# Altium schematic symbol library Altium_Library.SchLib: 822 symbols (part 13 of 17)
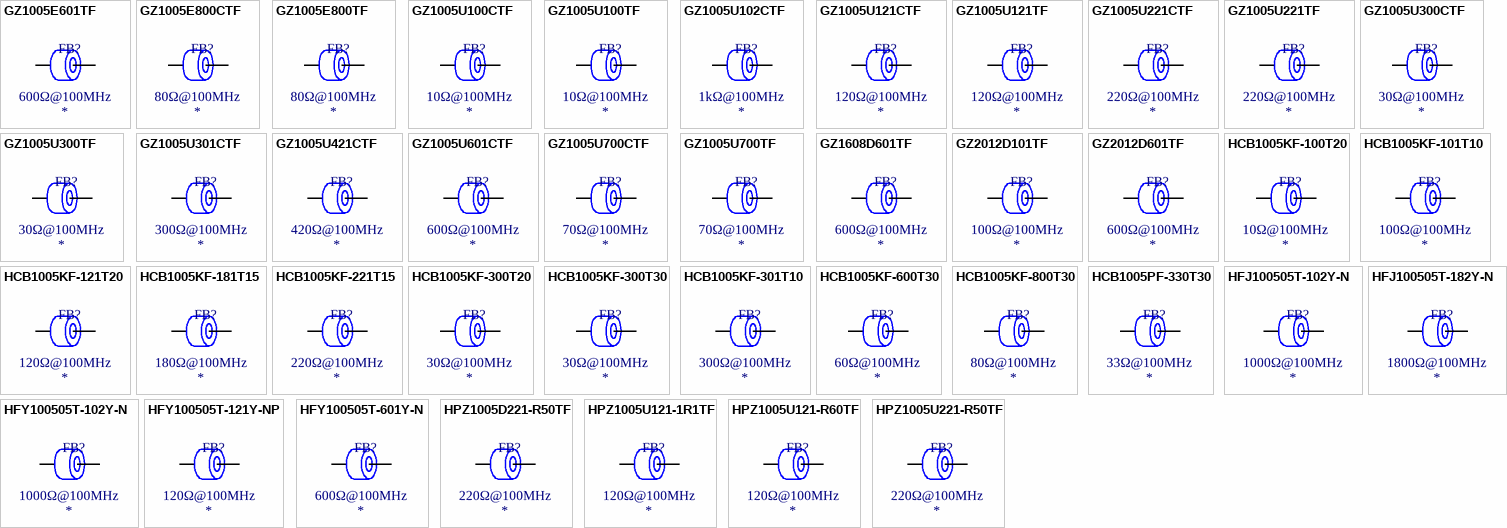
[diagram p32: symbols GZ1005E601TF to HPZ1005U221-R50TF]

## HCB1005KF-800T30
designator FB?  Impedance @ Frequency: 80Ω@100MHz
Ferrite, 80Ω@100MHz, ±25%, 40mΩ, 3A, SMD 0402; Manufacturer: TAI-TECH; Manufacturer Part Number: HCB1005KF-800T30; Package Size: 0402; JLCPCB Basic Part: No; JLCPCB Part Number: C2992343; Supplier 1: LCSC; Category: Ferrite Beads; Supplier Part Number 1: C2992343; Tolerance: ±25%; Rated Current: 3A; DC Resistance: 40mΩ; RoHS: Yes; ComponentLink1Description: Datasheet; ComponentLink1URL: https://wmsc.lcsc.com/wmsc/upload/file/pdf/v2/lcsc/2204251615_TAI-TECH-HCB1005KF-800T30_C2992343.pdf; ComponentLink2Description: JLCPCB Part URL; ComponentLink2URL: https://jlcpcb.com/partdetail/C2992343; ComponentLink3Description: LCSC Part URL; ComponentLink3URL: https://lcsc.com/product-detail/Ferrite-Beads_TAI-TECH-TAI-TECH-HCB1005KF-800T30_C2992343.html
footprint FB-0402 (0402 (1005M) Ferrite)
pins: 1, 2

## HCB1005PF-330T30
designator FB?  Impedance @ Frequency: 33Ω@100MHz
Ferrite, 33Ω@100MHz, ±25%, 22mΩ, 3A, SMD 0402; Manufacturer: TAI-TECH; Manufacturer Part Number: HCB1005PF-330T30; Package Size: 0402; JLCPCB Basic Part: No; JLCPCB Part Number: C155104; Supplier 1: LCSC; Category: Ferrite Beads; Supplier Part Number 1: C155104; Tolerance: ±25%; Rated Current: 3A; DC Resistance: 22mΩ; RoHS: Yes; ComponentLink1Description: Datasheet; ComponentLink1URL: https://wmsc.lcsc.com/wmsc/upload/file/pdf/v2/lcsc/2009171335_TAI-TECH-HCB1005PF-330T30_C155104.pdf; ComponentLink2Description: JLCPCB Part URL; ComponentLink2URL: https://jlcpcb.com/partdetail/C155104; ComponentLink3Description: LCSC Part URL; ComponentLink3URL: https://lcsc.com/product-detail/Ferrite-Beads_TAI-TECH-TAI-TECH-HCB1005PF-330T30_C155104.html
footprint FB-0402 (0402 (1005M) Ferrite)
pins: 1, 2

## HFJ100505T-102Y-N
designator FB?  Impedance @ Frequency: 1000Ω@100MHz
Ferrite, 1000Ω@100MHz, ±25%, 1.25Ω, 250mA, SMD 0402; Manufacturer: Chilisin Elec; Manufacturer Part Number: HFJ100505T-102Y-N; Package Size: 0402; JLCPCB Basic Part: No; JLCPCB Part Number: C365845; Supplier 1: LCSC; Category: Ferrite Beads; Supplier Part Number 1: C365845; Tolerance: ±25%; Rated Current: 250mA; DC Resistance: 1.25Ω; RoHS: Yes; ComponentLink1Description: Datasheet; ComponentLink1URL: https://wmsc.lcsc.com/wmsc/upload/file/pdf/v2/lcsc/1912111437_Chilisin-Elec-HFJ100505T-102Y-N_C365845.pdf; ComponentLink2Description: JLCPCB Part URL; ComponentLink2URL: https://jlcpcb.com/partdetail/C365845; ComponentLink3Description: LCSC Part URL; ComponentLink3URL: https://lcsc.com/product-detail/Ferrite-Beads_Chilisin-Elec-Chilisin-Elec-HFJ100505T-102Y-N_C365845.html
footprint FB-0402 (0402 (1005M) Ferrite)
pins: 1, 2

## HFJ100505T-182Y-N
designator FB?  Impedance @ Frequency: 1800Ω@100MHz
Ferrite, 1800Ω@100MHz, ±25%, 2.2Ω, 200mA, SMD 0402; Manufacturer: Chilisin Elec; Manufacturer Part Number: HFJ100505T-182Y-N; Package Size: 0402; JLCPCB Basic Part: No; JLCPCB Part Number: C285912; Supplier 1: LCSC; Category: Ferrite Beads; Supplier Part Number 1: C285912; Tolerance: ±25%; Rated Current: 200mA; DC Resistance: 2.2Ω; RoHS: Yes; ComponentLink1Description: Datasheet; ComponentLink1URL: https://wmsc.lcsc.com/wmsc/upload/file/pdf/v2/lcsc/1912111437_Chilisin-Elec-HFJ100505T-182Y-N_C285912.pdf; ComponentLink2Description: JLCPCB Part URL; ComponentLink2URL: https://jlcpcb.com/partdetail/C285912; ComponentLink3Description: LCSC Part URL; ComponentLink3URL: https://lcsc.com/product-detail/Ferrite-Beads_Chilisin-Elec-Chilisin-Elec-HFJ100505T-182Y-N_C285912.html
footprint FB-0402 (0402 (1005M) Ferrite)
pins: 1, 2

## HFY100505T-102Y-N
designator FB?  Impedance @ Frequency: 1000Ω@100MHz
Ferrite, 1000Ω@100MHz, ±25%, 1.1Ω, 250mA, SMD 0402; Manufacturer: Chilisin Elec; Manufacturer Part Number: HFY100505T-102Y-N; Package Size: 0402; JLCPCB Basic Part: No; JLCPCB Part Number: C108276; Supplier 1: LCSC; Category: Ferrite Beads; Supplier Part Number 1: C108276; Tolerance: ±25%; Rated Current: 250mA; DC Resistance: 1.1Ω; RoHS: Yes; ComponentLink1Description: Datasheet; ComponentLink1URL: https://wmsc.lcsc.com/wmsc/upload/file/pdf/v2/lcsc/1811141628_Chilisin-Elec-HFY100505T-102Y-N_C108276.pdf; ComponentLink2Description: JLCPCB Part URL; ComponentLink2URL: https://jlcpcb.com/partdetail/C108276; ComponentLink3Description: LCSC Part URL; ComponentLink3URL: https://lcsc.com/product-detail/Ferrite-Beads_Chilisin-Elec-Chilisin-Elec-HFY100505T-102Y-N_C108276.html
footprint FB-0402 (0402 (1005M) Ferrite)
pins: 1, 2

## HFY100505T-121Y-NP
designator FB?  Impedance @ Frequency: 120Ω@100MHz
Ferrite, 120Ω@100MHz, ±25%, 0.095Ω, 1500mA, SMD 0402; Manufacturer: Chilisin Elec; Manufacturer Part Number: HFY100505T-121Y-NP; Package Size: 0402; JLCPCB Basic Part: No; JLCPCB Part Number: C108277; Supplier 1: LCSC; Category: Ferrite Beads; Supplier Part Number 1: C108277; Tolerance: ±25%; Rated Current: 1500mA; DC Resistance: 0.095Ω; RoHS: Yes; ComponentLink1Description: Datasheet; ComponentLink1URL: https://wmsc.lcsc.com/wmsc/upload/file/pdf/v2/lcsc/1811141628_Chilisin-Elec-HFY100505T-121Y-NP_C108277.pdf; ComponentLink2Description: JLCPCB Part URL; ComponentLink2URL: https://jlcpcb.com/partdetail/C108277; ComponentLink3Description: LCSC Part URL; ComponentLink3URL: https://lcsc.com/product-detail/Ferrite-Beads_Chilisin-Elec-Chilisin-Elec-HFY100505T-121Y-NP_C108277.html
footprint FB-0402 (0402 (1005M) Ferrite)
pins: 1, 2

## HFY100505T-601Y-N
designator FB?  Impedance @ Frequency: 600Ω@100MHz
Ferrite, 600Ω@100MHz, ±25%, 0.7Ω, 300mA, SMD 0402; Manufacturer: Chilisin Elec; Manufacturer Part Number: HFY100505T-601Y-N; Package Size: 0402; JLCPCB Basic Part: No; JLCPCB Part Number: C142161; Supplier 1: LCSC; Category: Ferrite Beads; Supplier Part Number 1: C142161; Tolerance: ±25%; Rated Current: 300mA; DC Resistance: 0.7Ω; RoHS: Yes; ComponentLink1Description: Datasheet; ComponentLink1URL: https://wmsc.lcsc.com/wmsc/upload/file/pdf/v2/lcsc/1811141612_Chilisin-Elec-HFY100505T-601Y-N_C142161.pdf; ComponentLink2Description: JLCPCB Part URL; ComponentLink2URL: https://jlcpcb.com/partdetail/C142161; ComponentLink3Description: LCSC Part URL; ComponentLink3URL: https://lcsc.com/product-detail/Ferrite-Beads_Chilisin-Elec-Chilisin-Elec-HFY100505T-601Y-N_C142161.html
footprint FB-0402 (0402 (1005M) Ferrite)
pins: 1, 2

## HPZ1005D221-R50TF
designator FB?  Impedance @ Frequency: 220Ω@100MHz
Ferrite, 220Ω@100MHz, ±25%, 380mΩ, 500mA, SMD 0402; Manufacturer: Sunlord; Manufacturer Part Number: HPZ1005D221-R50TF; Package Size: 0402; JLCPCB Basic Part: No; JLCPCB Part Number: C369802; Supplier 1: LCSC; Category: Ferrite Beads; Supplier Part Number 1: C369802; Tolerance: ±25%; Rated Current: 500mA; DC Resistance: 380mΩ; RoHS: Yes; ComponentLink1Description: Datasheet; ComponentLink1URL: https://wmsc.lcsc.com/wmsc/upload/file/pdf/v2/lcsc/2310301509_Sunlord-HPZ1005D221-R50TF_C369802.pdf; ComponentLink2Description: JLCPCB Part URL; ComponentLink2URL: https://jlcpcb.com/partdetail/C369802; ComponentLink3Description: LCSC Part URL; ComponentLink3URL: https://lcsc.com/product-detail/Ferrite-Beads_Sunlord-Sunlord-HPZ1005D221-R50TF_C369802.html
footprint FB-0402 (0402 (1005M) Ferrite)
pins: 1, 2

## HPZ1005U121-1R1TF
designator FB?  Impedance @ Frequency: 120Ω@100MHz
Ferrite, 120Ω@100MHz, ±25%, 130mΩ, 1.1A, SMD 0402; Manufacturer: Sunlord; Manufacturer Part Number: HPZ1005U121-1R1TF; Package Size: 0402; JLCPCB Basic Part: No; JLCPCB Part Number: C185886; Supplier 1: LCSC; Category: Ferrite Beads; Supplier Part Number 1: C185886; Tolerance: ±25%; Rated Current: 1.1A; DC Resistance: 130mΩ; RoHS: Yes; ComponentLink1Description: Datasheet; ComponentLink1URL: https://wmsc.lcsc.com/wmsc/upload/file/pdf/v2/lcsc/2310301640_Sunlord-HPZ1005U121-1R1TF_C185886.pdf; ComponentLink2Description: JLCPCB Part URL; ComponentLink2URL: https://jlcpcb.com/partdetail/C185886; ComponentLink3Description: LCSC Part URL; ComponentLink3URL: https://lcsc.com/product-detail/Ferrite-Beads_Sunlord-Sunlord-HPZ1005U121-1R1TF_C185886.html
footprint FB-0402 (0402 (1005M) Ferrite)
pins: 1, 2

## HPZ1005U121-R60TF
designator FB?  Impedance @ Frequency: 120Ω@100MHz
Ferrite, 120Ω@100MHz, ±25%, 250mΩ, 600mA, SMD 0402; Manufacturer: Sunlord; Manufacturer Part Number: HPZ1005U121-R60TF; Package Size: 0402; JLCPCB Basic Part: No; JLCPCB Part Number: C369803; Supplier 1: LCSC; Category: Ferrite Beads; Supplier Part Number 1: C369803; Tolerance: ±25%; Rated Current: 600mA; DC Resistance: 250mΩ; RoHS: Yes; ComponentLink1Description: Datasheet; ComponentLink1URL: https://wmsc.lcsc.com/wmsc/upload/file/pdf/v2/lcsc/2310301640_Sunlord-HPZ1005U121-R60TF_C369803.pdf; ComponentLink2Description: JLCPCB Part URL; ComponentLink2URL: https://jlcpcb.com/partdetail/C369803; ComponentLink3Description: LCSC Part URL; ComponentLink3URL: https://lcsc.com/product-detail/Ferrite-Beads_Sunlord-Sunlord-HPZ1005U121-R60TF_C369803.html
footprint FB-0402 (0402 (1005M) Ferrite)
pins: 1, 2

## HPZ1005U221-R50TF
designator FB?  Impedance @ Frequency: 220Ω@100MHz
Ferrite, 220Ω@100MHz, ±25%, 380mΩ, 500mA, SMD 0402; Manufacturer: Sunlord; Manufacturer Part Number: HPZ1005U221-R50TF; Package Size: 0402; JLCPCB Basic Part: No; JLCPCB Part Number: C279857; Supplier 1: LCSC; Category: Ferrite Beads; Supplier Part Number 1: C279857; Tolerance: ±25%; Rated Current: 500mA; DC Resistance: 380mΩ; RoHS: Yes; ComponentLink1Description: Datasheet; ComponentLink1URL: https://wmsc.lcsc.com/wmsc/upload/file/pdf/v2/lcsc/2310301640_Sunlord-HPZ1005U221-R50TF_C279857.pdf; ComponentLink2Description: JLCPCB Part URL; ComponentLink2URL: https://jlcpcb.com/partdetail/C279857; ComponentLink3Description: LCSC Part URL; ComponentLink3URL: https://lcsc.com/product-detail/Ferrite-Beads_Sunlord-Sunlord-HPZ1005U221-R50TF_C279857.html
footprint FB-0402 (0402 (1005M) Ferrite)
pins: 1, 2

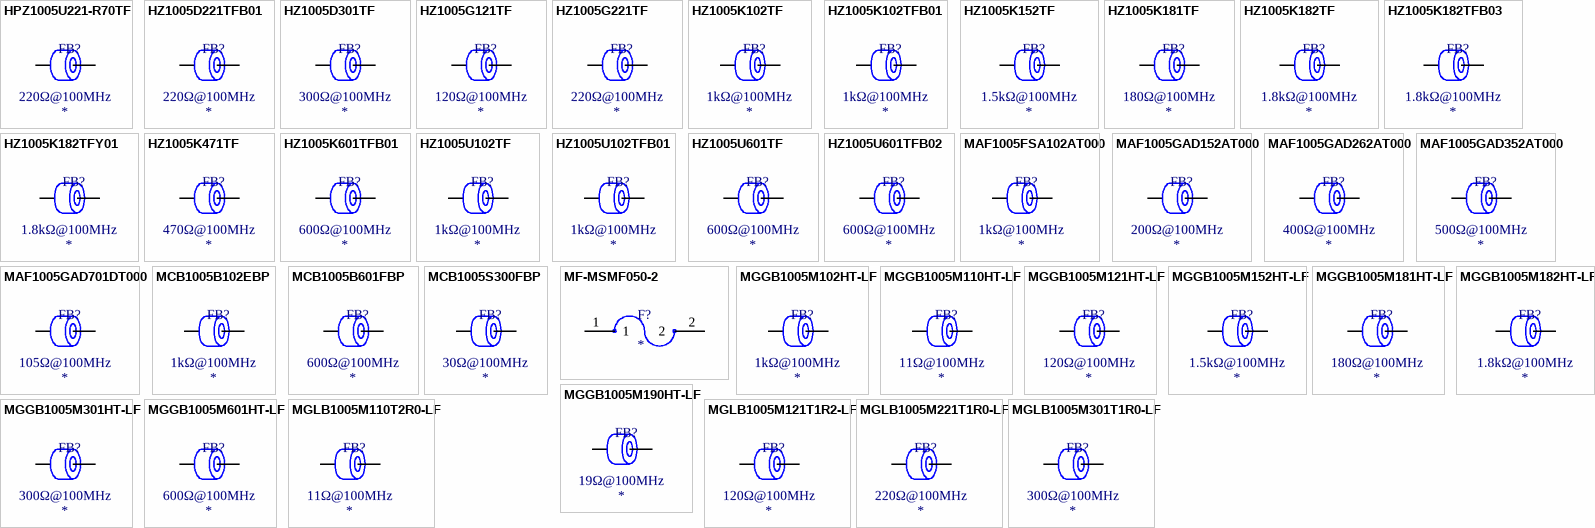
[diagram p15: symbols HPZ1005U221-R70TF to MGLB1005M301T1R0-LF]

## HPZ1005U221-R70TF
designator FB?  Impedance @ Frequency: 220Ω@100MHz
Ferrite, 220Ω@100MHz, ±25%, 700mΩ, 250mA, SMD 0402; Manufacturer: Sunlord; Manufacturer Part Number: HPZ1005U221-R70TF; Package Size: 0402; JLCPCB Basic Part: No; JLCPCB Part Number: C154130; Supplier 1: LCSC; Category: Ferrite Beads; Supplier Part Number 1: C154130; Tolerance: ±25%; Rated Current: 250mA; DC Resistance: 700mΩ; RoHS: Yes; ComponentLink1Description: Datasheet; ComponentLink1URL: https://wmsc.lcsc.com/wmsc/upload/file/pdf/v2/lcsc/2310301640_Sunlord-HPZ1005U221-R70TF_C154130.pdf; ComponentLink2Description: JLCPCB Part URL; ComponentLink2URL: https://jlcpcb.com/partdetail/C154130; ComponentLink3Description: LCSC Part URL; ComponentLink3URL: https://lcsc.com/product-detail/Ferrite-Beads_Sunlord-Sunlord-HPZ1005U221-R70TF_C154130.html
footprint FB-0402 (0402 (1005M) Ferrite)
pins: 1, 2

## HZ1005D221TFB01
designator FB?  Impedance @ Frequency: 220Ω@100MHz
Ferrite, 220Ω@100MHz, ±25%, 500mΩ, 300mA, SMD 0402; Manufacturer: Sunlord; Manufacturer Part Number: HZ1005D221TFB01; Package Size: 0402; JLCPCB Basic Part: No; JLCPCB Part Number: C185880; Supplier 1: LCSC; Category: Ferrite Beads; Supplier Part Number 1: C185880; Tolerance: ±25%; Rated Current: 300mA; DC Resistance: 500mΩ; RoHS: Yes; ComponentLink1Description: Datasheet; ComponentLink1URL: https://wmsc.lcsc.com/wmsc/upload/file/pdf/v2/lcsc/2310301640_Sunlord-HZ1005D221TFB01_C185880.pdf; ComponentLink2Description: JLCPCB Part URL; ComponentLink2URL: https://jlcpcb.com/partdetail/C185880; ComponentLink3Description: LCSC Part URL; ComponentLink3URL: https://lcsc.com/product-detail/Ferrite-Beads_Sunlord-Sunlord-HZ1005D221TFB01_C185880.html
footprint FB-0402 (0402 (1005M) Ferrite)
pins: 1, 2

## HZ1005D301TF
designator FB?  Impedance @ Frequency: 300Ω@100MHz
Ferrite, 300Ω@100MHz, ±25%, 1Ω, 100mA, SMD 0402; Manufacturer: Sunlord; Manufacturer Part Number: HZ1005D301TF; Package Size: 0402; JLCPCB Basic Part: No; JLCPCB Part Number: C185881; Supplier 1: LCSC; Category: Ferrite Beads; Supplier Part Number 1: C185881; Tolerance: ±25%; Rated Current: 100mA; DC Resistance: 1Ω; RoHS: Yes; ComponentLink1Description: Datasheet; ComponentLink1URL: https://wmsc.lcsc.com/wmsc/upload/file/pdf/v2/lcsc/2310301640_Sunlord-HZ1005D301TF_C185881.pdf; ComponentLink2Description: JLCPCB Part URL; ComponentLink2URL: https://jlcpcb.com/partdetail/C185881; ComponentLink3Description: LCSC Part URL; ComponentLink3URL: https://lcsc.com/product-detail/Ferrite-Beads_Sunlord-Sunlord-HZ1005D301TF_C185881.html
footprint FB-0402 (0402 (1005M) Ferrite)
pins: 1, 2

## HZ1005G121TF
designator FB?  Impedance @ Frequency: 120Ω@100MHz
Ferrite, 120Ω@100MHz, ±25%, 700mΩ, 300mA, SMD 0402; Manufacturer: Sunlord; Manufacturer Part Number: HZ1005G121TF; Package Size: 0402; JLCPCB Basic Part: No; JLCPCB Part Number: C185879; Supplier 1: LCSC; Category: Ferrite Beads; Supplier Part Number 1: C185879; Tolerance: ±25%; Rated Current: 300mA; DC Resistance: 700mΩ; RoHS: Yes; ComponentLink1Description: Datasheet; ComponentLink1URL: https://wmsc.lcsc.com/wmsc/upload/file/pdf/v2/lcsc/2310301640_Sunlord-HZ1005G121TF_C185879.pdf; ComponentLink2Description: JLCPCB Part URL; ComponentLink2URL: https://jlcpcb.com/partdetail/C185879; ComponentLink3Description: LCSC Part URL; ComponentLink3URL: https://lcsc.com/product-detail/Ferrite-Beads_Sunlord-Sunlord-HZ1005G121TF_C185879.html
footprint FB-0402 (0402 (1005M) Ferrite)
pins: 1, 2

## HZ1005G221TF
designator FB?  Impedance @ Frequency: 220Ω@100MHz
Ferrite, 220Ω@100MHz, ±25%, 1Ω, 250mA, SMD 0402; Manufacturer: Sunlord; Manufacturer Part Number: HZ1005G221TF; Package Size: 0402; JLCPCB Basic Part: No; JLCPCB Part Number: C369807; Supplier 1: LCSC; Category: Ferrite Beads; Supplier Part Number 1: C369807; Tolerance: ±25%; Rated Current: 250mA; DC Resistance: 1Ω; RoHS: Yes; ComponentLink1Description: Datasheet; ComponentLink1URL: https://wmsc.lcsc.com/wmsc/upload/file/pdf/v2/lcsc/2310301640_Sunlord-HZ1005G221TF_C369807.pdf; ComponentLink2Description: JLCPCB Part URL; ComponentLink2URL: https://jlcpcb.com/partdetail/C369807; ComponentLink3Description: LCSC Part URL; ComponentLink3URL: https://lcsc.com/product-detail/Ferrite-Beads_Sunlord-Sunlord-HZ1005G221TF_C369807.html
footprint FB-0402 (0402 (1005M) Ferrite)
pins: 1, 2

## HZ1005K102TF
designator FB?  Impedance @ Frequency: 1kΩ@100MHz
Ferrite, 1kΩ@100MHz, ±25%, 1.25Ω, 250mA, SMD 0402; Manufacturer: Sunlord; Manufacturer Part Number: HZ1005K102TF; Package Size: 0402; JLCPCB Basic Part: No; JLCPCB Part Number: C98296; Supplier 1: LCSC; Category: Ferrite Beads; Supplier Part Number 1: C98296; Tolerance: ±25%; Rated Current: 250mA; DC Resistance: 1.25Ω; RoHS: Yes; ComponentLink1Description: Datasheet; ComponentLink1URL: https://wmsc.lcsc.com/wmsc/upload/file/pdf/v2/lcsc/2310301640_Sunlord-HZ1005K102TF_C98296.pdf; ComponentLink2Description: JLCPCB Part URL; ComponentLink2URL: https://jlcpcb.com/partdetail/C98296; ComponentLink3Description: LCSC Part URL; ComponentLink3URL: https://lcsc.com/product-detail/Ferrite-Beads_Sunlord-Sunlord-HZ1005K102TF_C98296.html
footprint FB-0402 (0402 (1005M) Ferrite)
pins: 1, 2

## HZ1005K102TFB01
designator FB?  Impedance @ Frequency: 1kΩ@100MHz
Ferrite, 1kΩ@100MHz, ±25%, 1.25Ω, 250mA, SMD 0402; Manufacturer: Sunlord; Manufacturer Part Number: HZ1005K102TFB01; Package Size: 0402; JLCPCB Basic Part: No; JLCPCB Part Number: C154129; Supplier 1: LCSC; Category: Ferrite Beads; Supplier Part Number 1: C154129; Tolerance: ±25%; Rated Current: 250mA; DC Resistance: 1.25Ω; RoHS: Yes; ComponentLink1Description: Datasheet; ComponentLink1URL: https://wmsc.lcsc.com/wmsc/upload/file/pdf/v2/lcsc/2310301640_Sunlord-HZ1005K102TFB01_C154129.pdf; ComponentLink2Description: JLCPCB Part URL; ComponentLink2URL: https://jlcpcb.com/partdetail/C154129; ComponentLink3Description: LCSC Part URL; ComponentLink3URL: https://lcsc.com/product-detail/Ferrite-Beads_Sunlord-Sunlord-HZ1005K102TFB01_C154129.html
footprint FB-0402 (0402 (1005M) Ferrite)
pins: 1, 2

## HZ1005K152TF
designator FB?  Impedance @ Frequency: 1.5kΩ@100MHz
Ferrite, 1.5kΩ@100MHz, ±25%, 2.2Ω, 50mA, SMD 0402; Manufacturer: Sunlord; Manufacturer Part Number: HZ1005K152TF; Package Size: 0402; JLCPCB Basic Part: No; JLCPCB Part Number: C185874; Supplier 1: LCSC; Category: Ferrite Beads; Supplier Part Number 1: C185874; Tolerance: ±25%; Rated Current: 50mA; DC Resistance: 2.2Ω; RoHS: Yes; ComponentLink1Description: Datasheet; ComponentLink1URL: https://wmsc.lcsc.com/wmsc/upload/file/pdf/v2/lcsc/2310301640_Sunlord-HZ1005K152TF_C185874.pdf; ComponentLink2Description: JLCPCB Part URL; ComponentLink2URL: https://jlcpcb.com/partdetail/C185874; ComponentLink3Description: LCSC Part URL; ComponentLink3URL: https://lcsc.com/product-detail/Ferrite-Beads_Sunlord-Sunlord-HZ1005K152TF_C185874.html
footprint FB-0402 (0402 (1005M) Ferrite)
pins: 1, 2

## HZ1005K181TF
designator FB?  Impedance @ Frequency: 180Ω@100MHz
Ferrite, 180Ω@100MHz, ±25%, 1Ω, 100mA, SMD 0402; Manufacturer: Sunlord; Manufacturer Part Number: HZ1005K181TF; Package Size: 0402; JLCPCB Basic Part: No; JLCPCB Part Number: C185883; Supplier 1: LCSC; Category: Ferrite Beads; Supplier Part Number 1: C185883; Tolerance: ±25%; Rated Current: 100mA; DC Resistance: 1Ω; RoHS: Yes; ComponentLink1Description: Datasheet; ComponentLink1URL: https://wmsc.lcsc.com/wmsc/upload/file/pdf/v2/lcsc/2310301640_Sunlord-HZ1005K181TF_C185883.pdf; ComponentLink2Description: JLCPCB Part URL; ComponentLink2URL: https://jlcpcb.com/partdetail/C185883; ComponentLink3Description: LCSC Part URL; ComponentLink3URL: https://lcsc.com/product-detail/Ferrite-Beads_Sunlord-Sunlord-HZ1005K181TF_C185883.html
footprint FB-0402 (0402 (1005M) Ferrite)
pins: 1, 2

## HZ1005K182TF
designator FB?  Impedance @ Frequency: 1.8kΩ@100MHz
Ferrite, 1.8kΩ@100MHz, ±25%, SMD 0402; Manufacturer: Sunlord; Manufacturer Part Number: HZ1005K182TF; Package Size: 0402; JLCPCB Basic Part: No; JLCPCB Part Number: C370004; Supplier 1: LCSC; Category: Ferrite Beads; Supplier Part Number 1: C370004; Tolerance: ±25%; RoHS: Yes; ComponentLink1Description: Datasheet; ComponentLink1URL: https://wmsc.lcsc.com/wmsc/upload/file/pdf/v2/lcsc/2310301640_Sunlord-HZ1005K182TF_C370004.pdf; ComponentLink2Description: JLCPCB Part URL; ComponentLink2URL: https://jlcpcb.com/partdetail/C370004; ComponentLink3Description: LCSC Part URL; ComponentLink3URL: https://lcsc.com/product-detail/Ferrite-Beads_Sunlord-Sunlord-HZ1005K182TF_C370004.html
footprint FB-0402 (0402 (1005M) Ferrite)
pins: 1, 2

## HZ1005K182TFB03
designator FB?  Impedance @ Frequency: 1.8kΩ@100MHz
Ferrite, 1.8kΩ@100MHz, ±25%, 2.2Ω, 200mA, SMD 0402; Manufacturer: Sunlord; Manufacturer Part Number: HZ1005K182TFB03; Package Size: 0402; JLCPCB Basic Part: No; JLCPCB Part Number: C279553; Supplier 1: LCSC; Category: Ferrite Beads; Supplier Part Number 1: C279553; Tolerance: ±25%; Rated Current: 200mA; DC Resistance: 2.2Ω; RoHS: Yes; ComponentLink1Description: Datasheet; ComponentLink1URL: https://wmsc.lcsc.com/wmsc/upload/file/pdf/v2/lcsc/2310301640_Sunlord-HZ1005K182TFB03_C279553.pdf; ComponentLink2Description: JLCPCB Part URL; ComponentLink2URL: https://jlcpcb.com/partdetail/C279553; ComponentLink3Description: LCSC Part URL; ComponentLink3URL: https://lcsc.com/product-detail/Ferrite-Beads_Sunlord-Sunlord-HZ1005K182TFB03_C279553.html
footprint FB-0402 (0402 (1005M) Ferrite)
pins: 1, 2

## HZ1005K182TFY01
designator FB?  Impedance @ Frequency: 1.8kΩ@100MHz
Ferrite, 1.8kΩ@100MHz, ±25%, SMD 0402; Manufacturer: Sunlord; Manufacturer Part Number: HZ1005K182TFY01; Package Size: 0402; JLCPCB Basic Part: No; JLCPCB Part Number: C370005; Supplier 1: LCSC; Category: Ferrite Beads; Supplier Part Number 1: C370005; Tolerance: ±25%; RoHS: Yes; ComponentLink1Description: Datasheet; ComponentLink1URL: https://wmsc.lcsc.com/wmsc/upload/file/pdf/v2/lcsc/2310301640_Sunlord-HZ1005K182TFY01_C370005.pdf; ComponentLink2Description: JLCPCB Part URL; ComponentLink2URL: https://jlcpcb.com/partdetail/C370005; ComponentLink3Description: LCSC Part URL; ComponentLink3URL: https://lcsc.com/product-detail/Ferrite-Beads_Sunlord-Sunlord-HZ1005K182TFY01_C370005.html
footprint FB-0402 (0402 (1005M) Ferrite)
pins: 1, 2

## HZ1005K471TF
designator FB?  Impedance @ Frequency: 470Ω@100MHz
Ferrite, 470Ω@100MHz, ±25%, 1.3Ω, 100mA, SMD 0402; Manufacturer: Sunlord; Manufacturer Part Number: HZ1005K471TF; Package Size: 0402; JLCPCB Basic Part: No; JLCPCB Part Number: C185885; Supplier 1: LCSC; Category: Ferrite Beads; Supplier Part Number 1: C185885; Tolerance: ±25%; Rated Current: 100mA; DC Resistance: 1.3Ω; RoHS: Yes; ComponentLink1Description: Datasheet; ComponentLink1URL: https://wmsc.lcsc.com/wmsc/upload/file/pdf/v2/lcsc/2310301640_Sunlord-HZ1005K471TF_C185885.pdf; ComponentLink2Description: JLCPCB Part URL; ComponentLink2URL: https://jlcpcb.com/partdetail/C185885; ComponentLink3Description: LCSC Part URL; ComponentLink3URL: https://lcsc.com/product-detail/Ferrite-Beads_Sunlord-Sunlord-HZ1005K471TF_C185885.html
footprint FB-0402 (0402 (1005M) Ferrite)
pins: 1, 2

## HZ1005K601TFB01
designator FB?  Impedance @ Frequency: 600Ω@100MHz
Ferrite, 600Ω@100MHz, ±25%, 850mΩ, 300mA, SMD 0402; Manufacturer: Sunlord; Manufacturer Part Number: HZ1005K601TFB01; Package Size: 0402; JLCPCB Basic Part: No; JLCPCB Part Number: C154128; Supplier 1: LCSC; Category: Ferrite Beads; Supplier Part Number 1: C154128; Tolerance: ±25%; Rated Current: 300mA; DC Resistance: 850mΩ; RoHS: Yes; ComponentLink1Description: Datasheet; ComponentLink1URL: https://wmsc.lcsc.com/wmsc/upload/file/pdf/v2/lcsc/2310301640_Sunlord-HZ1005K601TFB01_C154128.pdf; ComponentLink2Description: JLCPCB Part URL; ComponentLink2URL: https://jlcpcb.com/partdetail/C154128; ComponentLink3Description: LCSC Part URL; ComponentLink3URL: https://lcsc.com/product-detail/Ferrite-Beads_Sunlord-Sunlord-HZ1005K601TFB01_C154128.html
footprint FB-0402 (0402 (1005M) Ferrite)
pins: 1, 2

## HZ1005U102TF
designator FB?  Impedance @ Frequency: 1kΩ@100MHz
Ferrite, 1kΩ@100MHz, ±25%, 1.1Ω, 250mA, SMD 0402; Manufacturer: Sunlord; Manufacturer Part Number: HZ1005U102TF; Package Size: 0402; JLCPCB Basic Part: No; JLCPCB Part Number: C279808; Supplier 1: LCSC; Category: Ferrite Beads; Supplier Part Number 1: C279808; Tolerance: ±25%; Rated Current: 250mA; DC Resistance: 1.1Ω; RoHS: Yes; ComponentLink1Description: Datasheet; ComponentLink1URL: https://wmsc.lcsc.com/wmsc/upload/file/pdf/v2/lcsc/2310301640_Sunlord-HZ1005U102TF_C279808.pdf; ComponentLink2Description: JLCPCB Part URL; ComponentLink2URL: https://jlcpcb.com/partdetail/C279808; ComponentLink3Description: LCSC Part URL; ComponentLink3URL: https://lcsc.com/product-detail/Ferrite-Beads_Sunlord-Sunlord-HZ1005U102TF_C279808.html
footprint FB-0402 (0402 (1005M) Ferrite)
pins: 1, 2

## HZ1005U102TFB01
designator FB?  Impedance @ Frequency: 1kΩ@100MHz
Ferrite, 1kΩ@100MHz, ±25%, 1.1Ω, 250mA, SMD 0402; Manufacturer: Sunlord; Manufacturer Part Number: HZ1005U102TFB01; Package Size: 0402; JLCPCB Basic Part: No; JLCPCB Part Number: C279551; Supplier 1: LCSC; Category: Ferrite Beads; Supplier Part Number 1: C279551; Tolerance: ±25%; Rated Current: 250mA; DC Resistance: 1.1Ω; RoHS: Yes; ComponentLink1Description: Datasheet; ComponentLink1URL: https://wmsc.lcsc.com/wmsc/upload/file/pdf/v2/lcsc/2310301640_Sunlord-HZ1005U102TFB01_C279551.pdf; ComponentLink2Description: JLCPCB Part URL; ComponentLink2URL: https://jlcpcb.com/partdetail/C279551; ComponentLink3Description: LCSC Part URL; ComponentLink3URL: https://lcsc.com/product-detail/Ferrite-Beads_Sunlord-Sunlord-HZ1005U102TFB01_C279551.html
footprint FB-0402 (0402 (1005M) Ferrite)
pins: 1, 2

## HZ1005U601TF
designator FB?  Impedance @ Frequency: 600Ω@100MHz
Ferrite, 600Ω@100MHz, ±25%, 700mΩ, 300mA, SMD 0402; Manufacturer: Sunlord; Manufacturer Part Number: HZ1005U601TF; Package Size: 0402; JLCPCB Basic Part: No; JLCPCB Part Number: C279739; Supplier 1: LCSC; Category: Ferrite Beads; Supplier Part Number 1: C279739; Tolerance: ±25%; Rated Current: 300mA; DC Resistance: 700mΩ; RoHS: Yes; ComponentLink1Description: Datasheet; ComponentLink1URL: https://wmsc.lcsc.com/wmsc/upload/file/pdf/v2/lcsc/2310301640_Sunlord-HZ1005U601TF_C279739.pdf; ComponentLink2Description: JLCPCB Part URL; ComponentLink2URL: https://jlcpcb.com/partdetail/C279739; ComponentLink3Description: LCSC Part URL; ComponentLink3URL: https://lcsc.com/product-detail/Ferrite-Beads_Sunlord-Sunlord-HZ1005U601TF_C279739.html
footprint FB-0402 (0402 (1005M) Ferrite)
pins: 1, 2

## HZ1005U601TFB02
designator FB?  Impedance @ Frequency: 600Ω@100MHz
Ferrite, 600Ω@100MHz, ±25%, 700mΩ, 300mA, SMD 0402; Manufacturer: Sunlord; Manufacturer Part Number: HZ1005U601TFB02; Package Size: 0402; JLCPCB Basic Part: No; JLCPCB Part Number: C370006; Supplier 1: LCSC; Category: Ferrite Beads; Supplier Part Number 1: C370006; Tolerance: ±25%; Rated Current: 300mA; DC Resistance: 700mΩ; RoHS: Yes; ComponentLink1Description: Datasheet; ComponentLink1URL: https://wmsc.lcsc.com/wmsc/upload/file/pdf/v2/lcsc/2310301640_Sunlord-HZ1005U601TFB02_C370006.pdf; ComponentLink2Description: JLCPCB Part URL; ComponentLink2URL: https://jlcpcb.com/partdetail/C370006; ComponentLink3Description: LCSC Part URL; ComponentLink3URL: https://lcsc.com/product-detail/Ferrite-Beads_Sunlord-Sunlord-HZ1005U601TFB02_C370006.html
footprint FB-0402 (0402 (1005M) Ferrite)
pins: 1, 2

## MAF1005FSA102AT000
designator FB?  Impedance @ Frequency: 1kΩ@100MHz
Ferrite, 1kΩ@100MHz, ±25%, 900mΩ, 230mA, SMD 0402; Manufacturer: TDK; Manufacturer Part Number: MAF1005FSA102AT000; Package Size: 0402; JLCPCB Basic Part: No; JLCPCB Part Number: C432983; Supplier 1: LCSC; Category: Ferrite Beads; Supplier Part Number 1: C432983; Tolerance: ±25%; Rated Current: 230mA; DC Resistance: 900mΩ; RoHS: Yes; ComponentLink1Description: Datasheet; ComponentLink1URL: https://wmsc.lcsc.com/wmsc/upload/file/pdf/v2/lcsc/1912111437_TDK-MAF1005FSA102AT000_C432983.pdf; ComponentLink2Description: JLCPCB Part URL; ComponentLink2URL: https://jlcpcb.com/partdetail/C432983; ComponentLink3Description: LCSC Part URL; ComponentLink3URL: https://lcsc.com/product-detail/Ferrite-Beads_TDK-TDK-MAF1005FSA102AT000_C432983.html
footprint FB-0402 (0402 (1005M) Ferrite)
pins: 1, 2

## MAF1005GAD152AT000
designator FB?  Impedance @ Frequency: 200Ω@100MHz
Ferrite, 200Ω@100MHz, ±25%, 700mΩ, 400mA, SMD 0402; Manufacturer: TDK; Manufacturer Part Number: MAF1005GAD152AT000; Package Size: 0402; JLCPCB Basic Part: No; JLCPCB Part Number: C413911; Supplier 1: LCSC; Category: Ferrite Beads; Supplier Part Number 1: C413911; Tolerance: ±25%; Rated Current: 400mA; DC Resistance: 700mΩ; RoHS: Yes; ComponentLink1Description: Datasheet; ComponentLink1URL: https://wmsc.lcsc.com/wmsc/upload/file/pdf/v2/lcsc/2304140030_TDK-MAF1005GAD152AT000_C413911.pdf; ComponentLink2Description: JLCPCB Part URL; ComponentLink2URL: https://jlcpcb.com/partdetail/C413911; ComponentLink3Description: LCSC Part URL; ComponentLink3URL: https://lcsc.com/product-detail/Ferrite-Beads_TDK-TDK-MAF1005GAD152AT000_C413911.html
footprint FB-0402 (0402 (1005M) Ferrite)
pins: 1, 2

## MAF1005GAD262AT000
designator FB?  Impedance @ Frequency: 400Ω@100MHz
Ferrite, 400Ω@100MHz, ±25%, 1.2Ω, 300mA, SMD 0402; Manufacturer: TDK; Manufacturer Part Number: MAF1005GAD262AT000; Package Size: 0402; JLCPCB Basic Part: No; JLCPCB Part Number: C2680657; Supplier 1: LCSC; Category: Ferrite Beads; Supplier Part Number 1: C2680657; Tolerance: ±25%; Rated Current: 300mA; DC Resistance: 1.2Ω; RoHS: Yes; ComponentLink1Description: Datasheet; ComponentLink1URL: https://wmsc.lcsc.com/wmsc/upload/file/pdf/v2/lcsc/2101051104_TDK-MAF1005GAD262AT000_C2680657.pdf; ComponentLink2Description: JLCPCB Part URL; ComponentLink2URL: https://jlcpcb.com/partdetail/C2680657; ComponentLink3Description: LCSC Part URL; ComponentLink3URL: https://lcsc.com/product-detail/Ferrite-Beads_TDK-TDK-MAF1005GAD262AT000_C2680657.html
footprint FB-0402 (0402 (1005M) Ferrite)
pins: 1, 2

## MAF1005GAD352AT000
designator FB?  Impedance @ Frequency: 500Ω@100MHz
Ferrite, 500Ω@100MHz, 1.65Ω, SMD 0402; Manufacturer: TDK; Manufacturer Part Number: MAF1005GAD352AT000; Package Size: 0402; JLCPCB Basic Part: No; JLCPCB Part Number: C2662026; Supplier 1: LCSC; Category: Ferrite Beads; Supplier Part Number 1: C2662026; DC Resistance: 1.65Ω; RoHS: Yes; ComponentLink1Description: Datasheet; ComponentLink1URL: https://wmsc.lcsc.com/wmsc/upload/file/pdf/v2/lcsc/2401161205_TDK-MAF1005GAD352AT000_C2662026.pdf; ComponentLink2Description: JLCPCB Part URL; ComponentLink2URL: https://jlcpcb.com/partdetail/C2662026; ComponentLink3Description: LCSC Part URL; ComponentLink3URL: https://lcsc.com/product-detail/Ferrite-Beads_TDK-TDK-MAF1005GAD352AT000_C2662026.html
footprint FB-0402 (0402 (1005M) Ferrite)
pins: 1, 2

## MAF1005GAD701DT000
designator FB?  Impedance @ Frequency: 105Ω@100MHz
Ferrite, 105Ω@100MHz, ±25%, 351mΩ, 800mA, SMD 0402; Manufacturer: TDK; Manufacturer Part Number: MAF1005GAD701DT000; Package Size: 0402; JLCPCB Basic Part: No; JLCPCB Part Number: C531393; Supplier 1: LCSC; Category: Ferrite Beads; Supplier Part Number 1: C531393; Tolerance: ±25%; Rated Current: 800mA; DC Resistance: 351mΩ; RoHS: Yes; ComponentLink1Description: Datasheet; ComponentLink1URL: https://wmsc.lcsc.com/wmsc/upload/file/pdf/v2/lcsc/2304140030_TDK-MAF1005GAD701DT000_C531393.pdf; ComponentLink2Description: JLCPCB Part URL; ComponentLink2URL: https://jlcpcb.com/partdetail/C531393; ComponentLink3Description: LCSC Part URL; ComponentLink3URL: https://lcsc.com/product-detail/Ferrite-Beads_TDK-TDK-MAF1005GAD701DT000_C531393.html
footprint FB-0402 (0402 (1005M) Ferrite)
pins: 1, 2

## MCB1005B102EBP
designator FB?  Impedance @ Frequency: 1kΩ@100MHz
Ferrite, 1kΩ@100MHz, ±25%, 1Ω, 200mA, SMD 0402; Manufacturer: INPAQ; Manufacturer Part Number: MCB1005B102EBP; Package Size: 0402; JLCPCB Basic Part: No; JLCPCB Part Number: C693036; Supplier 1: LCSC; Category: Ferrite Beads; Supplier Part Number 1: C693036; Tolerance: ±25%; Rated Current: 200mA; DC Resistance: 1Ω; RoHS: Yes; ComponentLink1Description: Datasheet; ComponentLink1URL: https://wmsc.lcsc.com/wmsc/upload/file/pdf/v2/lcsc/2304140030_INPAQ-MCB1005B102EBP_C693036.pdf; ComponentLink2Description: JLCPCB Part URL; ComponentLink2URL: https://jlcpcb.com/partdetail/C693036; ComponentLink3Description: LCSC Part URL; ComponentLink3URL: https://lcsc.com/product-detail/Ferrite-Beads_INPAQ-INPAQ-MCB1005B102EBP_C693036.html
footprint FB-0402 (0402 (1005M) Ferrite)
pins: 1, 2

## MCB1005B601FBP
designator FB?  Impedance @ Frequency: 600Ω@100MHz
Ferrite, 600Ω@100MHz, ±25%, 600mΩ, 300mA, SMD 0402; Manufacturer: INPAQ; Manufacturer Part Number: MCB1005B601FBP; Package Size: 0402; JLCPCB Basic Part: No; JLCPCB Part Number: C964131; Supplier 1: LCSC; Category: Ferrite Beads; Supplier Part Number 1: C964131; Tolerance: ±25%; Rated Current: 300mA; DC Resistance: 600mΩ; RoHS: Yes; ComponentLink1Description: Datasheet; ComponentLink1URL: https://wmsc.lcsc.com/wmsc/upload/file/pdf/v2/lcsc/2304140030_INPAQ-MCB1005B601FBP_C964131.pdf; ComponentLink2Description: JLCPCB Part URL; ComponentLink2URL: https://jlcpcb.com/partdetail/C964131; ComponentLink3Description: LCSC Part URL; ComponentLink3URL: https://lcsc.com/product-detail/Ferrite-Beads_INPAQ-INPAQ-MCB1005B601FBP_C964131.html
footprint FB-0402 (0402 (1005M) Ferrite)
pins: 1, 2

## MCB1005S300FBP
designator FB?  Impedance @ Frequency: 30Ω@100MHz
Ferrite, 30Ω@100MHz, ±25%, 250mΩ, 300mA, SMD 0402; Manufacturer: INPAQ; Manufacturer Part Number: MCB1005S300FBP; Package Size: 0402; JLCPCB Basic Part: No; JLCPCB Part Number: C964127; Supplier 1: LCSC; Category: Ferrite Beads; Supplier Part Number 1: C964127; Tolerance: ±25%; Rated Current: 300mA; DC Resistance: 250mΩ; RoHS: Yes; ComponentLink1Description: Datasheet; ComponentLink1URL: https://wmsc.lcsc.com/wmsc/upload/file/pdf/v2/lcsc/2012231310_INPAQ-MCB1005S300FBP_C964127.pdf; ComponentLink2Description: JLCPCB Part URL; ComponentLink2URL: https://jlcpcb.com/partdetail/C964127; ComponentLink3Description: LCSC Part URL; ComponentLink3URL: https://lcsc.com/product-detail/Ferrite-Beads_INPAQ-INPAQ-MCB1005S300FBP_C964127.html
footprint FB-0402 (0402 (1005M) Ferrite)
pins: 1, 2

## MF-MSMF050-2
designator F?
Polymeric PTC Resettable Fuse 15V 500 mA Ih Surface Mount 1812 (4532 Metric), Concave; MP: MF-MSMF050-2; MF: Bourns; Availability: In Stock; Check_prices: https://www.snapeda.com/parts/MF-MSMF050-2/Bourns+-+J.W.+Miller/view-part/?ref=eda; Price: None; Package: 1812 Bourns; Purchase-URL: https://pricing.snapeda.com/search/part/MF-MSMF050-2/?ref=eda; Value: *; SnapEDA_Link: https://www.snapeda.com/parts/MF-MSMF050-2/Bourns+-+J.W.+Miller/view-part/?ref=snap
footprint FUSM4632X85
pins: 1, 2

## MGGB1005M102HT-LF
designator FB?  Impedance @ Frequency: 1kΩ@100MHz
Ferrite, 1kΩ@100MHz, ±25%, 1.3Ω, 100mA, SMD 0402; Manufacturer: microgate; Manufacturer Part Number: MGGB1005M102HT-LF; Package Size: 0402; JLCPCB Basic Part: No; JLCPCB Part Number: C281126; Supplier 1: LCSC; Category: Ferrite Beads; Supplier Part Number 1: C281126; Tolerance: ±25%; Rated Current: 100mA; DC Resistance: 1.3Ω; RoHS: Yes; ComponentLink1Description: Datasheet; ComponentLink1URL: https://wmsc.lcsc.com/wmsc/upload/file/pdf/v2/lcsc/2304140030_microgate-MGGB1005M102HT-LF_C281126.pdf; ComponentLink2Description: JLCPCB Part URL; ComponentLink2URL: https://jlcpcb.com/partdetail/C281126; ComponentLink3Description: LCSC Part URL; ComponentLink3URL: https://lcsc.com/product-detail/Ferrite-Beads_microgate-microgate-MGGB1005M102HT-LF_C281126.html
footprint FB-0402 (0402 (1005M) Ferrite)
pins: 1, 2

## MGGB1005M110HT-LF
designator FB?  Impedance @ Frequency: 11Ω@100MHz
Ferrite, 11Ω@100MHz, ±25%, 0.05Ω, 500mA, SMD 0402; Manufacturer: microgate; Manufacturer Part Number: MGGB1005M110HT-LF; Package Size: 0402; JLCPCB Basic Part: No; JLCPCB Part Number: C281127; Supplier 1: LCSC; Category: Ferrite Beads; Supplier Part Number 1: C281127; Tolerance: ±25%; Rated Current: 500mA; DC Resistance: 0.05Ω; RoHS: Yes; ComponentLink1Description: Datasheet; ComponentLink1URL: https://wmsc.lcsc.com/wmsc/upload/file/pdf/v2/lcsc/2304140030_microgate-MGGB1005M110HT-LF_C281127.pdf; ComponentLink2Description: JLCPCB Part URL; ComponentLink2URL: https://jlcpcb.com/partdetail/C281127; ComponentLink3Description: LCSC Part URL; ComponentLink3URL: https://lcsc.com/product-detail/Ferrite-Beads_microgate-microgate-MGGB1005M110HT-LF_C281127.html
footprint FB-0402 (0402 (1005M) Ferrite)
pins: 1, 2

## MGGB1005M121HT-LF
designator FB?  Impedance @ Frequency: 120Ω@100MHz
Ferrite, 120Ω@100MHz, ±25%, 0.4Ω, 150mA, SMD 0402; Manufacturer: microgate; Manufacturer Part Number: MGGB1005M121HT-LF; Package Size: 0402; JLCPCB Basic Part: No; JLCPCB Part Number: C281128; Supplier 1: LCSC; Category: Ferrite Beads; Supplier Part Number 1: C281128; Tolerance: ±25%; Rated Current: 150mA; DC Resistance: 0.4Ω; RoHS: Yes; ComponentLink1Description: Datasheet; ComponentLink1URL: https://wmsc.lcsc.com/wmsc/upload/file/pdf/v2/lcsc/2304140030_microgate-MGGB1005M121HT-LF_C281128.pdf; ComponentLink2Description: JLCPCB Part URL; ComponentLink2URL: https://jlcpcb.com/partdetail/C281128; ComponentLink3Description: LCSC Part URL; ComponentLink3URL: https://lcsc.com/product-detail/Ferrite-Beads_microgate-microgate-MGGB1005M121HT-LF_C281128.html
footprint FB-0402 (0402 (1005M) Ferrite)
pins: 1, 2

## MGGB1005M152HT-LF
designator FB?  Impedance @ Frequency: 1.5kΩ@100MHz
Ferrite, 1.5kΩ@100MHz, ±25%, 1.4Ω, 100mA, SMD 0402; Manufacturer: microgate; Manufacturer Part Number: MGGB1005M152HT-LF; Package Size: 0402; JLCPCB Basic Part: No; JLCPCB Part Number: C281129; Supplier 1: LCSC; Category: Ferrite Beads; Supplier Part Number 1: C281129; Tolerance: ±25%; Rated Current: 100mA; DC Resistance: 1.4Ω; RoHS: Yes; ComponentLink1Description: Datasheet; ComponentLink1URL: https://wmsc.lcsc.com/wmsc/upload/file/pdf/v2/lcsc/2304140030_microgate-MGGB1005M152HT-LF_C281129.pdf; ComponentLink2Description: JLCPCB Part URL; ComponentLink2URL: https://jlcpcb.com/partdetail/C281129; ComponentLink3Description: LCSC Part URL; ComponentLink3URL: https://lcsc.com/product-detail/Ferrite-Beads_microgate-microgate-MGGB1005M152HT-LF_C281129.html
footprint FB-0402 (0402 (1005M) Ferrite)
pins: 1, 2

## MGGB1005M181HT-LF
designator FB?  Impedance @ Frequency: 180Ω@100MHz
Ferrite, 180Ω@100MHz, ±25%, 0.5Ω, 150mA, SMD 0402; Manufacturer: microgate; Manufacturer Part Number: MGGB1005M181HT-LF; Package Size: 0402; JLCPCB Basic Part: No; JLCPCB Part Number: C281130; Supplier 1: LCSC; Category: Ferrite Beads; Supplier Part Number 1: C281130; Tolerance: ±25%; Rated Current: 150mA; DC Resistance: 0.5Ω; RoHS: Yes; ComponentLink1Description: Datasheet; ComponentLink1URL: https://wmsc.lcsc.com/wmsc/upload/file/pdf/v2/lcsc/2304140030_microgate-MGGB1005M181HT-LF_C281130.pdf; ComponentLink2Description: JLCPCB Part URL; ComponentLink2URL: https://jlcpcb.com/partdetail/C281130; ComponentLink3Description: LCSC Part URL; ComponentLink3URL: https://lcsc.com/product-detail/Ferrite-Beads_microgate-microgate-MGGB1005M181HT-LF_C281130.html
footprint FB-0402 (0402 (1005M) Ferrite)
pins: 1, 2

## MGGB1005M182HT-LF
designator FB?  Impedance @ Frequency: 1.8kΩ@100MHz
Ferrite, 1.8kΩ@100MHz, ±25%, 1.4Ω, 100mA, SMD 0402; Manufacturer: microgate; Manufacturer Part Number: MGGB1005M182HT-LF; Package Size: 0402; JLCPCB Basic Part: No; JLCPCB Part Number: C281131; Supplier 1: LCSC; Category: Ferrite Beads; Supplier Part Number 1: C281131; Tolerance: ±25%; Rated Current: 100mA; DC Resistance: 1.4Ω; RoHS: Yes; ComponentLink1Description: Datasheet; ComponentLink1URL: https://wmsc.lcsc.com/wmsc/upload/file/pdf/v2/lcsc/2304140030_microgate-MGGB1005M182HT-LF_C281131.pdf; ComponentLink2Description: JLCPCB Part URL; ComponentLink2URL: https://jlcpcb.com/partdetail/C281131; ComponentLink3Description: LCSC Part URL; ComponentLink3URL: https://lcsc.com/product-detail/Ferrite-Beads_microgate-microgate-MGGB1005M182HT-LF_C281131.html
footprint FB-0402 (0402 (1005M) Ferrite)
pins: 1, 2

## MGGB1005M190HT-LF
designator FB?  Impedance @ Frequency: 19Ω@100MHz
Ferrite, 19Ω@100MHz, ±25%, 0.05Ω, 300mA, SMD 0402; Manufacturer: microgate; Manufacturer Part Number: MGGB1005M190HT-LF; Package Size: 0402; JLCPCB Basic Part: No; JLCPCB Part Number: C281132; Supplier 1: LCSC; Category: Ferrite Beads; Supplier Part Number 1: C281132; Tolerance: ±25%; Rated Current: 300mA; DC Resistance: 0.05Ω; RoHS: Yes; ComponentLink1Description: Datasheet; ComponentLink1URL: https://wmsc.lcsc.com/wmsc/upload/file/pdf/v2/lcsc/2304140030_microgate-MGGB1005M190HT-LF_C281132.pdf; ComponentLink2Description: JLCPCB Part URL; ComponentLink2URL: https://jlcpcb.com/partdetail/C281132; ComponentLink3Description: LCSC Part URL; ComponentLink3URL: https://lcsc.com/product-detail/Ferrite-Beads_microgate-microgate-MGGB1005M190HT-LF_C281132.html
footprint FB-0402 (0402 (1005M) Ferrite)
pins: 1, 2

## MGGB1005M301HT-LF
designator FB?  Impedance @ Frequency: 300Ω@100MHz
Ferrite, 300Ω@100MHz, ±25%, 0.65Ω, 100mA, SMD 0402; Manufacturer: microgate; Manufacturer Part Number: MGGB1005M301HT-LF; Package Size: 0402; JLCPCB Basic Part: No; JLCPCB Part Number: C281133; Supplier 1: LCSC; Category: Ferrite Beads; Supplier Part Number 1: C281133; Tolerance: ±25%; Rated Current: 100mA; DC Resistance: 0.65Ω; RoHS: Yes; ComponentLink1Description: Datasheet; ComponentLink1URL: https://wmsc.lcsc.com/wmsc/upload/file/pdf/v2/lcsc/2304140030_microgate-MGGB1005M301HT-LF_C281133.pdf; ComponentLink2Description: JLCPCB Part URL; ComponentLink2URL: https://jlcpcb.com/partdetail/C281133; ComponentLink3Description: LCSC Part URL; ComponentLink3URL: https://lcsc.com/product-detail/Ferrite-Beads_microgate-microgate-MGGB1005M301HT-LF_C281133.html
footprint FB-0402 (0402 (1005M) Ferrite)
pins: 1, 2

## MGGB1005M601HT-LF
designator FB?  Impedance @ Frequency: 600Ω@100MHz
Ferrite, 600Ω@100MHz, ±25%, 1Ω, 100mA, SMD 0402; Manufacturer: microgate; Manufacturer Part Number: MGGB1005M601HT-LF; Package Size: 0402; JLCPCB Basic Part: No; JLCPCB Part Number: C281136; Supplier 1: LCSC; Category: Ferrite Beads; Supplier Part Number 1: C281136; Tolerance: ±25%; Rated Current: 100mA; DC Resistance: 1Ω; RoHS: Yes; ComponentLink1Description: Datasheet; ComponentLink1URL: https://wmsc.lcsc.com/wmsc/upload/file/pdf/v2/lcsc/2304140030_microgate-MGGB1005M601HT-LF_C281136.pdf; ComponentLink2Description: JLCPCB Part URL; ComponentLink2URL: https://jlcpcb.com/partdetail/C281136; ComponentLink3Description: LCSC Part URL; ComponentLink3URL: https://lcsc.com/product-detail/Ferrite-Beads_microgate-microgate-MGGB1005M601HT-LF_C281136.html
footprint FB-0402 (0402 (1005M) Ferrite)
pins: 1, 2

## MGLB1005M110T2R0-LF
designator FB?  Impedance @ Frequency: 11Ω@100MHz
Ferrite, 11Ω@100MHz, ±25%, 50mΩ, 2A, SMD 0402; Manufacturer: microgate; Manufacturer Part Number: MGLB1005M110T2R0-LF; Package Size: 0402; JLCPCB Basic Part: No; JLCPCB Part Number: C281194; Supplier 1: LCSC; Category: Ferrite Beads; Supplier Part Number 1: C281194; Tolerance: ±25%; Rated Current: 2A; DC Resistance: 50mΩ; RoHS: Yes; ComponentLink1Description: Datasheet; ComponentLink1URL: https://wmsc.lcsc.com/wmsc/upload/file/pdf/v2/lcsc/2304140030_microgate-MGLB1005M110T2R0-LF_C281194.pdf; ComponentLink2Description: JLCPCB Part URL; ComponentLink2URL: https://jlcpcb.com/partdetail/C281194; ComponentLink3Description: LCSC Part URL; ComponentLink3URL: https://lcsc.com/product-detail/Ferrite-Beads_microgate-microgate-MGLB1005M110T2R0-LF_C281194.html
footprint FB-0402 (0402 (1005M) Ferrite)
pins: 1, 2

## MGLB1005M121T1R2-LF
designator FB?  Impedance @ Frequency: 120Ω@100MHz
Ferrite, 120Ω@100MHz, ±25%, 100mΩ, 1.2A, SMD 0402; Manufacturer: microgate; Manufacturer Part Number: MGLB1005M121T1R2-LF; Package Size: 0402; JLCPCB Basic Part: No; JLCPCB Part Number: C281195; Supplier 1: LCSC; Category: Ferrite Beads; Supplier Part Number 1: C281195; Tolerance: ±25%; Rated Current: 1.2A; DC Resistance: 100mΩ; RoHS: Yes; ComponentLink1Description: Datasheet; ComponentLink1URL: https://wmsc.lcsc.com/wmsc/upload/file/pdf/v2/lcsc/2304140030_microgate-MGLB1005M121T1R2-LF_C281195.pdf; ComponentLink2Description: JLCPCB Part URL; ComponentLink2URL: https://jlcpcb.com/partdetail/C281195; ComponentLink3Description: LCSC Part URL; ComponentLink3URL: https://lcsc.com/product-detail/Ferrite-Beads_microgate-microgate-MGLB1005M121T1R2-LF_C281195.html
footprint FB-0402 (0402 (1005M) Ferrite)
pins: 1, 2

## MGLB1005M221T1R0-LF
designator FB?  Impedance @ Frequency: 220Ω@100MHz
Ferrite, 220Ω@100MHz, ±25%, 150mΩ, 1A, SMD 0402; Manufacturer: microgate; Manufacturer Part Number: MGLB1005M221T1R0-LF; Package Size: 0402; JLCPCB Basic Part: No; JLCPCB Part Number: C281196; Supplier 1: LCSC; Category: Ferrite Beads; Supplier Part Number 1: C281196; Tolerance: ±25%; Rated Current: 1A; DC Resistance: 150mΩ; RoHS: Yes; ComponentLink1Description: Datasheet; ComponentLink1URL: https://wmsc.lcsc.com/wmsc/upload/file/pdf/v2/lcsc/2304140030_microgate-MGLB1005M221T1R0-LF_C281196.pdf; ComponentLink2Description: JLCPCB Part URL; ComponentLink2URL: https://jlcpcb.com/partdetail/C281196; ComponentLink3Description: LCSC Part URL; ComponentLink3URL: https://lcsc.com/product-detail/Ferrite-Beads_microgate-microgate-MGLB1005M221T1R0-LF_C281196.html
footprint FB-0402 (0402 (1005M) Ferrite)
pins: 1, 2

## MGLB1005M301T1R0-LF
designator FB?  Impedance @ Frequency: 300Ω@100MHz
Ferrite, 300Ω@100MHz, ±25%, 200mΩ, 1A, SMD 0402; Manufacturer: microgate; Manufacturer Part Number: MGLB1005M301T1R0-LF; Package Size: 0402; JLCPCB Basic Part: No; JLCPCB Part Number: C281197; Supplier 1: LCSC; Category: Ferrite Beads; Supplier Part Number 1: C281197; Tolerance: ±25%; Rated Current: 1A; DC Resistance: 200mΩ; RoHS: Yes; ComponentLink1Description: Datasheet; ComponentLink1URL: https://wmsc.lcsc.com/wmsc/upload/file/pdf/v2/lcsc/2304140030_microgate-MGLB1005M301T1R0-LF_C281197.pdf; ComponentLink2Description: JLCPCB Part URL; ComponentLink2URL: https://jlcpcb.com/partdetail/C281197; ComponentLink3Description: LCSC Part URL; ComponentLink3URL: https://lcsc.com/product-detail/Ferrite-Beads_microgate-microgate-MGLB1005M301T1R0-LF_C281197.html
footprint FB-0402 (0402 (1005M) Ferrite)
pins: 1, 2

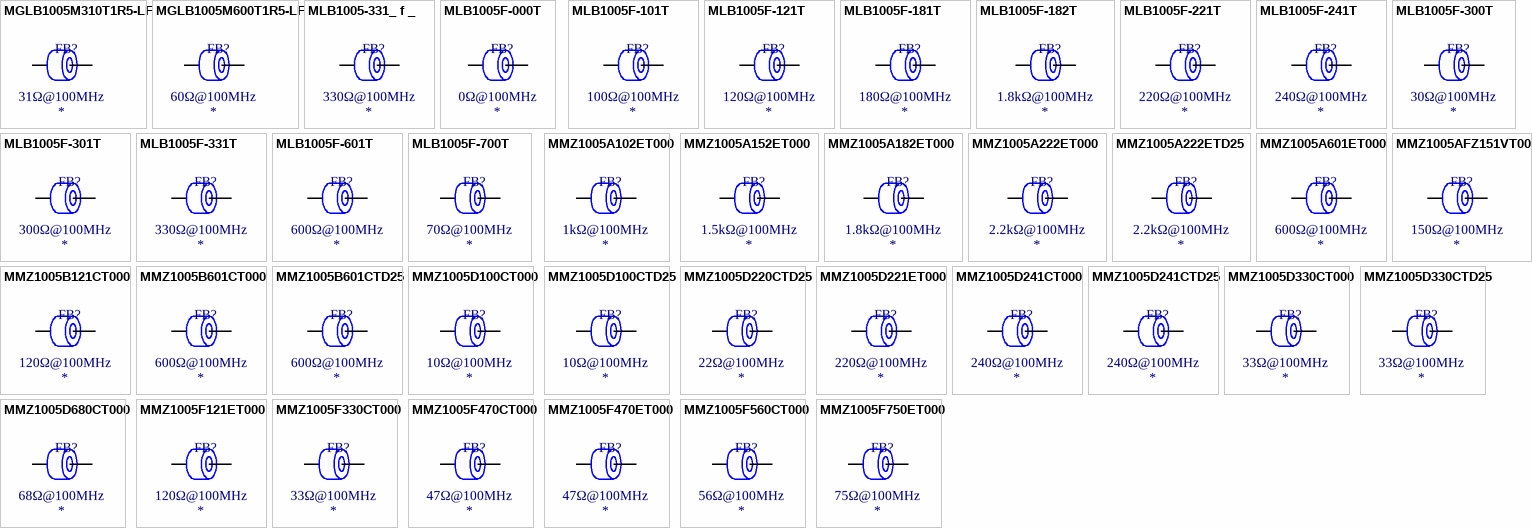
[diagram p16: symbols MGLB1005M310T1R5-LF to MMZ1005F750ET000]

## MGLB1005M310T1R5-LF
designator FB?  Impedance @ Frequency: 31Ω@100MHz
Ferrite, 31Ω@100MHz, ±25%, 60mΩ, 1.5A, SMD 0402; Manufacturer: microgate; Manufacturer Part Number: MGLB1005M310T1R5-LF; Package Size: 0402; JLCPCB Basic Part: No; JLCPCB Part Number: C281198; Supplier 1: LCSC; Category: Ferrite Beads; Supplier Part Number 1: C281198; Tolerance: ±25%; Rated Current: 1.5A; DC Resistance: 60mΩ; RoHS: Yes; ComponentLink1Description: Datasheet; ComponentLink1URL: https://wmsc.lcsc.com/wmsc/upload/file/pdf/v2/lcsc/2304140030_microgate-MGLB1005M310T1R5-LF_C281198.pdf; ComponentLink2Description: JLCPCB Part URL; ComponentLink2URL: https://jlcpcb.com/partdetail/C281198; ComponentLink3Description: LCSC Part URL; ComponentLink3URL: https://lcsc.com/product-detail/Ferrite-Beads_microgate-microgate-MGLB1005M310T1R5-LF_C281198.html
footprint FB-0402 (0402 (1005M) Ferrite)
pins: 1, 2

## MGLB1005M600T1R5-LF
designator FB?  Impedance @ Frequency: 60Ω@100MHz
Ferrite, 60Ω@100MHz, ±25%, 80mΩ, 1.5A, SMD 0402; Manufacturer: microgate; Manufacturer Part Number: MGLB1005M600T1R5-LF; Package Size: 0402; JLCPCB Basic Part: No; JLCPCB Part Number: C281199; Supplier 1: LCSC; Category: Ferrite Beads; Supplier Part Number 1: C281199; Tolerance: ±25%; Rated Current: 1.5A; DC Resistance: 80mΩ; RoHS: Yes; ComponentLink1Description: Datasheet; ComponentLink1URL: https://wmsc.lcsc.com/wmsc/upload/file/pdf/v2/lcsc/2304140030_microgate-MGLB1005M600T1R5-LF_C281199.pdf; ComponentLink2Description: JLCPCB Part URL; ComponentLink2URL: https://jlcpcb.com/partdetail/C281199; ComponentLink3Description: LCSC Part URL; ComponentLink3URL: https://lcsc.com/product-detail/Ferrite-Beads_microgate-microgate-MGLB1005M600T1R5-LF_C281199.html
footprint FB-0402 (0402 (1005M) Ferrite)
pins: 1, 2

## MLB1005-331_ f _
designator FB?  Impedance @ Frequency: 330Ω@100MHz
Ferrite, 330Ω@100MHz, ±25%, 500mΩ, 100mA, SMD 0402; Manufacturer: Meled; Manufacturer Part Number: MLB1005-331( f ); Package Size: 0402; JLCPCB Basic Part: No; JLCPCB Part Number: C35047; Supplier 1: LCSC; Category: Ferrite Beads; Supplier Part Number 1: C35047; Tolerance: ±25%; Rated Current: 100mA; DC Resistance: 500mΩ; RoHS: Yes; ComponentLink1Description: Datasheet; ComponentLink1URL: https://wmsc.lcsc.com/wmsc/upload/file/pdf/v2/lcsc/1809140117_MetalLions-MLB1005-331--f-_C35047.pdf; ComponentLink2Description: JLCPCB Part URL; ComponentLink2URL: https://jlcpcb.com/partdetail/C35047; ComponentLink3Description: LCSC Part URL; ComponentLink3URL: https://lcsc.com/product-detail/Ferrite-Beads_Meled-Meled-MLB1005-331-f-_C35047.html
footprint FB-0402 (0402 (1005M) Ferrite)
pins: 1, 2

## MLB1005F-000T
designator FB?  Impedance @ Frequency: 0Ω@100MHz
Ferrite, 0Ω@100MHz, ±25%, SMD 0402; Manufacturer: Meled; Manufacturer Part Number: MLB1005F-000T; Package Size: 0402; JLCPCB Basic Part: No; JLCPCB Part Number: C2844526; Supplier 1: LCSC; Category: Ferrite Beads; Supplier Part Number 1: C2844526; Tolerance: ±25%; RoHS: Yes; ComponentLink1Description: Datasheet; ComponentLink1URL: https://wmsc.lcsc.com/wmsc/upload/file/pdf/v2/lcsc/2306021141_MetalLions-MLB1005F-000T_C2844526.pdf; ComponentLink2Description: JLCPCB Part URL; ComponentLink2URL: https://jlcpcb.com/partdetail/C2844526; ComponentLink3Description: LCSC Part URL; ComponentLink3URL: https://lcsc.com/product-detail/Ferrite-Beads_MetalLions-MetalLions-MLB1005F-000T_C2844526.html
footprint FB-0402 (0402 (1005M) Ferrite)
pins: 1, 2

## MLB1005F-101T
designator FB?  Impedance @ Frequency: 100Ω@100MHz
Ferrite, 100Ω@100MHz, ±25%, SMD 0402; Manufacturer: Meled; Manufacturer Part Number: MLB1005F-101T; Package Size: 0402; JLCPCB Basic Part: No; JLCPCB Part Number: C2844534; Supplier 1: LCSC; Category: Ferrite Beads; Supplier Part Number 1: C2844534; Tolerance: ±25%; RoHS: Yes; ComponentLink1Description: Datasheet; ComponentLink1URL: https://wmsc.lcsc.com/wmsc/upload/file/pdf/v2/lcsc/2306021142_MetalLions-MLB1005F-101T_C2844534.pdf; ComponentLink2Description: JLCPCB Part URL; ComponentLink2URL: https://jlcpcb.com/partdetail/C2844534; ComponentLink3Description: LCSC Part URL; ComponentLink3URL: https://lcsc.com/product-detail/Ferrite-Beads_Meled-Meled-MLB1005F-101T_C2844534.html
footprint FB-0402 (0402 (1005M) Ferrite)
pins: 1, 2

## MLB1005F-121T
designator FB?  Impedance @ Frequency: 120Ω@100MHz
Ferrite, 120Ω@100MHz, ±25%, 400mΩ, 200mA, SMD 0402; Manufacturer: Meled; Manufacturer Part Number: MLB1005F-121T; Package Size: 0402; JLCPCB Basic Part: No; JLCPCB Part Number: C2844535; Supplier 1: LCSC; Category: Ferrite Beads; Supplier Part Number 1: C2844535; Tolerance: ±25%; Rated Current: 200mA; DC Resistance: 400mΩ; RoHS: Yes; ComponentLink1Description: Datasheet; ComponentLink1URL: https://wmsc.lcsc.com/wmsc/upload/file/pdf/v2/lcsc/2306021142_MetalLions-MLB1005F-121T_C2844535.pdf; ComponentLink2Description: JLCPCB Part URL; ComponentLink2URL: https://jlcpcb.com/partdetail/C2844535; ComponentLink3Description: LCSC Part URL; ComponentLink3URL: https://lcsc.com/product-detail/Ferrite-Beads_MetalLions-MetalLions-MLB1005F-121T_C2844535.html
footprint FB-0402 (0402 (1005M) Ferrite)
pins: 1, 2